# Altium schematic symbol library CS43131-CNZ.SchLib: 1 symbol
Pins are listed as number, name and electrical type; pins without a type are passive.

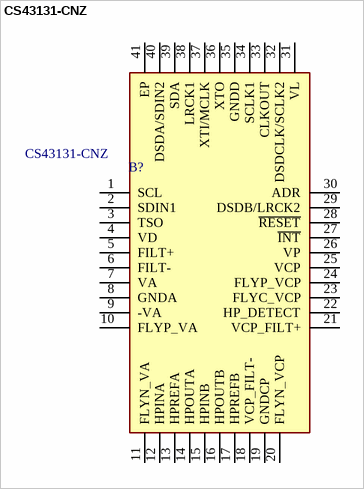
[diagram p0: symbol CS43131-CNZ]

## CS43131-CNZ
designator B?
Audio D/A Converter ICs 130dB 32-bit Hi-Perf DAC w/HP Drvr ImpDet; Manufacturer_Name: Cirrus Logic; Geometry.Height: 0.8mm; Mouser Part Number: 777-CS43131-CNZ; Mouser Price/Stock: https://www.mouser.co.uk/ProductDetail/Cirrus-Logic/CS43131-CNZ?qs=%252BEew9%252B0nqrDUhBYVE1mW3Q%3D%3D; Manufacturer_Part_Number: CS43131-CNZ; Datasheet Link: *
footprint CS43131_PCB (Footprint not found)
footprint BGA42C40P6X7_355X284X50N
pins: 1 SCL, 2 SDIN1, 3 TSO, 4 VD, 5 FILT+, 6 FILT-, 7 VA, 8 GNDA, 9 -VA, 10 FLYP_VA, 11 FLYN_VA, 12 HPINA, 13 HPREFA, 14 HPOUTA, 15 HPINB, 16 HPOUTB, 17 HPREFB, 18 VCP_FILT-, 19 GNDCP, 20 FLYN_VCP, 21 VCP_FILT+, 22 HP_DETECT, 23 FLYC_VCP, 24 FLYP_VCP, 25 VCP, 26 VP, 27 ~{INT}, 28 ~{RESET}, 29 DSDB/LRCK2, 30 ADR, 31 VL, 32 DSDCLK/SCLK2, 33 CLKOUT, 34 SCLK1, 35 GNDD, 36 XTO, 37 XTI/MCLK, 38 LRCK1, 39 SDA, 40 DSDA/SDIN2, 41 EP